# Altium footprint library HS20S010B.PcbLib: 1 footprints
Each footprint in its own frame and in the unit in brackets; x right, y up, seen from the top. Pads: shape width x height; smd on the part's side, far side on the other; paste and mask are expansions set on the pad; w line width, h text height; cw(c..) or ccw(c..) is an arc to the next point about the centre after c.
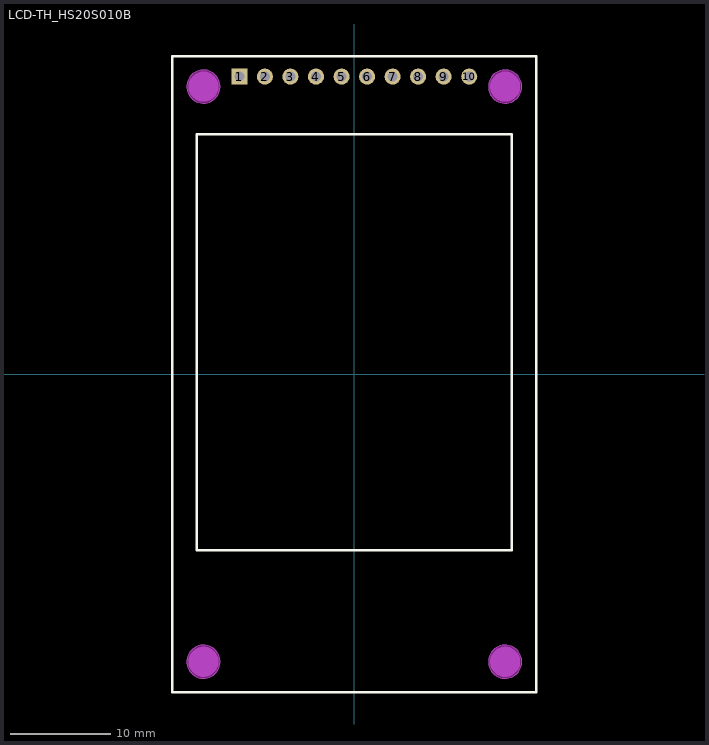
[diagram p0: the footprint, top view; thin cyan lines are the x and y axes]

## LCD-TH_HS20S010B [mm]
pads (10):
  rect 1.6x1.6 hole 1: 1(-11.43,29.6)
  round 1.6 hole 1: 2(-8.89,29.6) 3(-6.35,29.6) 4(-3.81,29.6) 5(-1.27,29.6) 6(1.27,29.6) 7(3.81,29.6) 8(6.35,29.6) 9(8.89,29.6) 10(11.43,29.6)
Top Overlay:
  lines w0.254: -18.1,-31.623 -18.1,31.623 18.1,31.623 18.1,-31.623 -18.1,-31.623 ; -15.675,-17.487 15.675,-17.487 15.675,23.863 -15.675,23.863 -15.675,-17.487
Keep-Out Layer:
  drawing of 4 lines, arcs and shapes, not listed
Keep-Out Layer:
  drawing of 12 lines, arcs and shapes, not listed
Mechanical 1:
  circle w0.003: c-15,28.6 r1.65
  circle w0.003: c15,28.6 r1.65
  circle w0.003: c15,-28.6 r1.65
  circle w0.003: c-15,-28.6 r1.65
Mechanical 2:
  circle w1.5: c15,28.6 r0.75
  circle w1.5: c-15,28.6 r0.75
  circle w1.5: c-15,-28.6 r0.75
  circle w1.5: c15,-28.6 r0.75
Mechanical 6:
  lines w0.051: -18.1,-31.6 -18.1,31.6 18.1,31.6 18.1,-31.6 -18.1,-31.6
Mechanical 8:
  region: -18.04,31.6 -18.04,31.595 -18.041,31.586 -18.044,31.577 -18.049,31.568 -18.054,31.561 -18.061,31.554 -18.068,31.549 -18.077,31.544 -18.086,31.541 -18.095,31.54 -18.105,31.54 -18.114,31.541 -18.123,31.544 -18.131,31.549 -18.139,31.554 -18.146,31.561 -18.151,31.568 -18.156,31.577 -18.158,31.586 -18.16,31.595 -18.16,31.6 -18.16,31.605 -18.158,31.614 -18.156,31.623 -18.151,31.631 -18.146,31.639 -18.139,31.646 -18.131,31.651 -18.123,31.656 -18.114,31.658 -18.105,31.66 -18.095,31.66 -18.086,31.658 -18.077,31.656 -18.068,31.651 -18.061,31.646 -18.054,31.639 -18.049,31.631 -18.044,31.623 -18.041,31.614 -18.04,31.605 -18.04,31.6
Mechanical 9:
  drawing of 10 lines, arcs and shapes, not listed